# Altium schematic symbol library TitansLib.SchLib: 462 symbols (part 11 of 24)
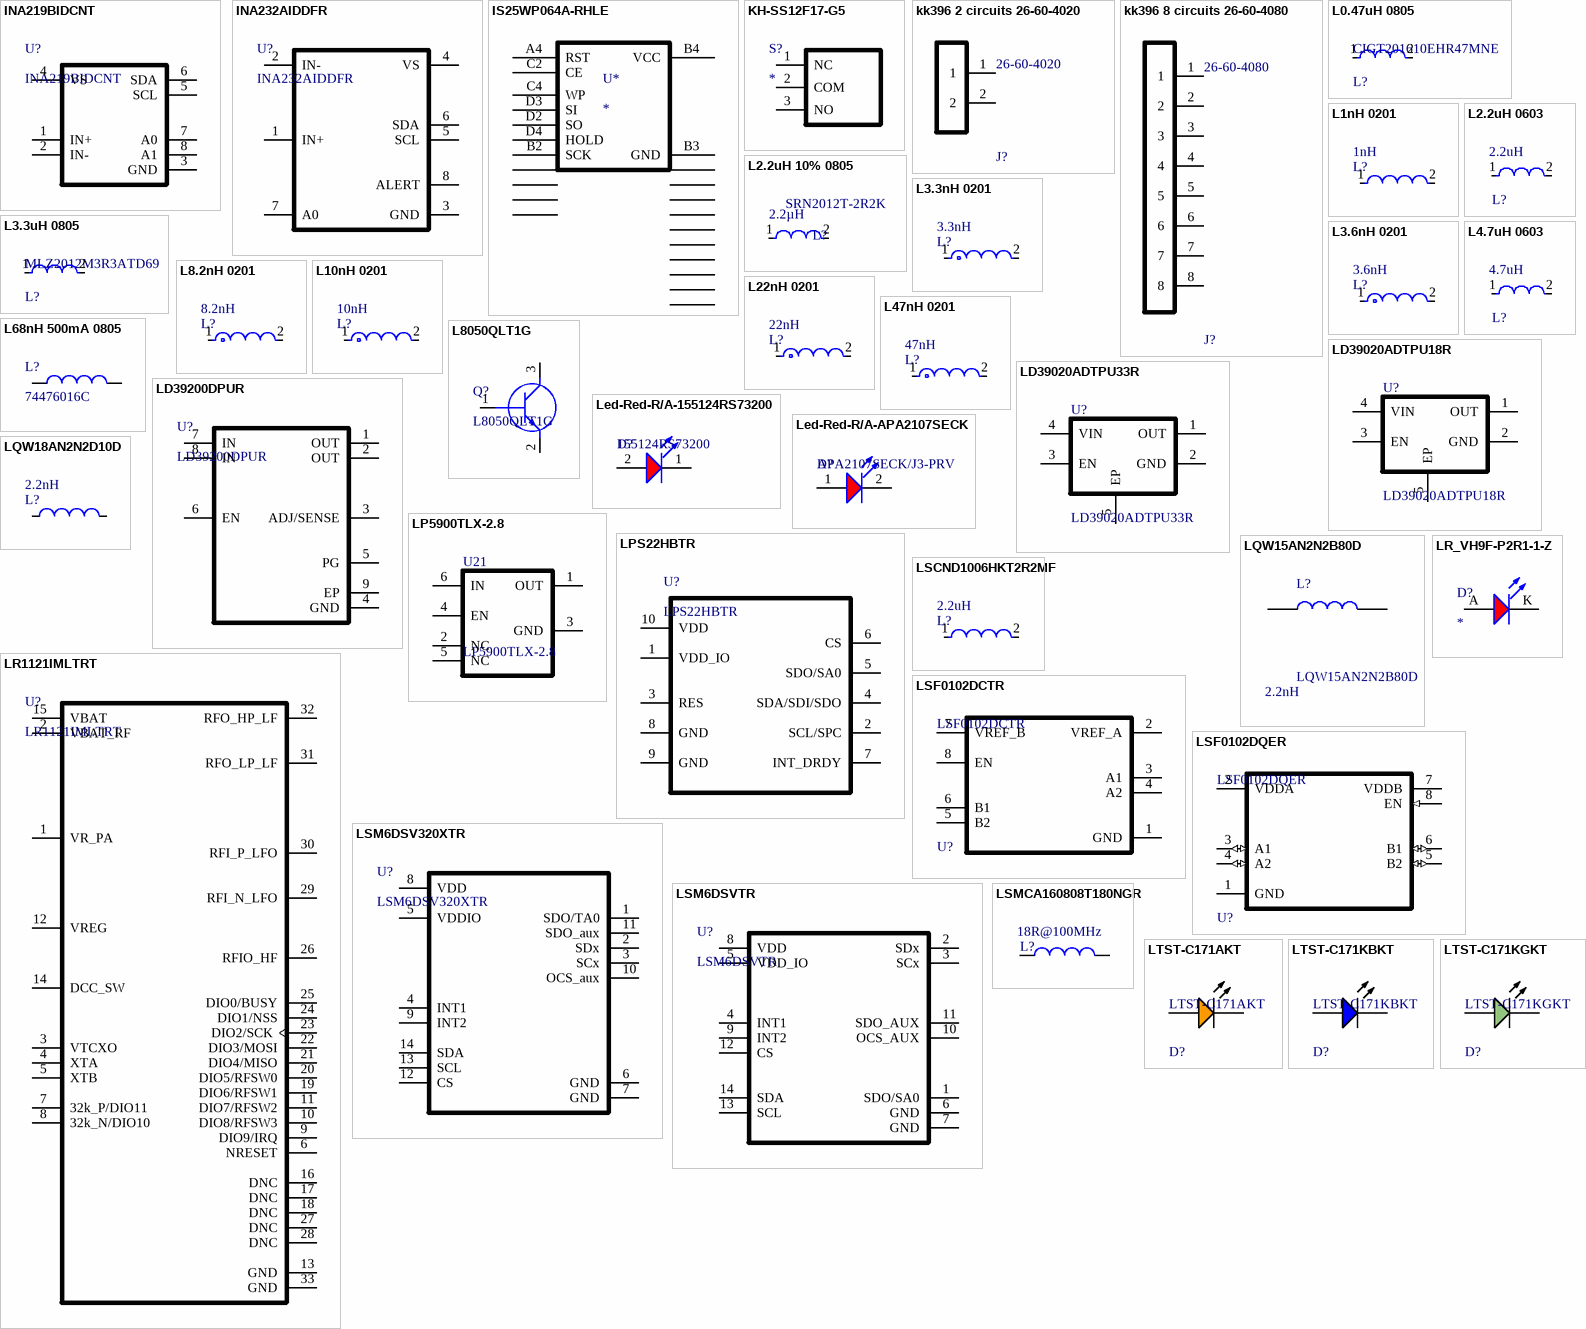
[diagram p27: symbols INA219BIDCNT to LTST-C171KGKT]

## L10nH 0201
designator L?, comment value 10nH  (hidden comment: LQP03TN10NJ02D)
Inductor RF Chip Thin Film 10nH 5% 500MHz 14Q-Factor 250mA 700mOhm DCR 0201 Paper T/R; Manufacturer: Murata; Manufacturer Lifecycle Status: IN PRODUCTION; Core Material: Non-Magnetic; DC Resistance (DCR): 700mΩ; Number of Circuits: 1; Q Factor: 14; Self Resonant Frequency: 3.2GHz; Shielding: Unshielded; Supplier: DigiKey; Supplier Part Number: 490-5568-1-ND; Manufacturer Part Number: LQP03TN10NJ02D; RoHS: Compliant; Category: Fixed Inductors; Stock: 86071; Pricing: 1=0.1, 10=0.025, 100=0.0208, 1000=0.0171, 5000=0.01491 (USD); Case/Package: 0201; Case Code (Imperial): 0201; Case Code (Metric): 0603; Composition: Thin Film; Country of Origin: Japan; Current Rating: 250mA; DC Current: 250mA; Depth: 330µm; Export Control Classification Number (ECCN) Code: EAR99; Height: 300µm; Height - Seated (Max): 330.2µm; Harmonized Tariff Schedule (HTS) Code: 8504.50.80.00; Introduction Date: 2009-08-10; Length: 600µm; Lifecycle Status: Production; Max Current Rating: 250mA; Max DC Current: 250mA; Max Operating Temperature: 125°C; Military Standard: Not; Min Operating Temperature: -55°C; Mounting Technology: Surface Mount; Number of Terminals: 2; Radiation Hardening: No; REACH SVHC: Yes; RMS Current (Irms): 250mA; Schedule B: 8504500000, 8504500000|8504500000|8504500000|8504500000|8504500000; ESR: 700mΩ; Termination: SMD/SMT; Test Frequency: 500MHz; Tolerance: 5%; Width: 300µm; ComponentLink1URL: https://datasheet.octopart.com:443/LQP03TN10NJ02D-Murata-datasheet-80324116.pdf?src-supplier=Geoflip; ComponentLink1Description: https://datasheet.octopart.com:443/LQP03TN10NJ02D-Murata-datasheet-80324116.pdf?src-supplier=Geoflip; ComponentLink2URL: https://datasheet.octopart.com:443/LQP03TN10NJ02D-Murata-datasheet-141289363.pdf?src-supplier=Ciiva; ComponentLink2Description: https://datasheet.octopart.com:443/LQP03TN10NJ02D-Murata-datasheet-141289363.pdf?src-supplier=Ciiva; ComponentLink3URL: https://datasheet.octopart.com:443/LQP03TN10NJ02D-Murata-datasheet-140715333.pdf?src-supplier=Ciiva; ComponentLink3Description: https://datasheet.octopart.com:443/LQP03TN10NJ02D-Murata-datasheet-140715333.pdf?src-supplier=Ciiva; ComponentLink4URL: https://datasheet.octopart.com:443/LQP03TN10NJ02D-Murata-datasheet-138756408.pdf?src-supplier=Ciiva; ComponentLink4Description: https://datasheet.octopart.com:443/LQP03TN10NJ02D-Murata-datasheet-138756408.pdf?src-supplier=Ciiva; ComponentLink5URL: https://datasheet.octopart.com:443/LQP03TN10NJ02D-Murata-datasheet-142296035.pdf?src-supplier=Arrow.cn; ComponentLink5Description: https://datasheet.octopart.com:443/LQP03TN10NJ02D-Murata-datasheet-142296035.pdf?src-supplier=Arrow.cn; ComponentLink6URL: https://datasheet.octopart.com:443/LQP03TN10NJ02D-Murata-datasheet-113139571.pdf?src-supplier=Future+Electronics; ComponentLink6Description: https://datasheet.octopart.com:443/LQP03TN10NJ02D-Murata-datasheet-113139571.pdf?src-supplier=Future+Electronics; ComponentLink7URL: https://datasheet.octopart.com:443/LQP03TN10NJ02D-Murata-datasheet-11551019.pdf?src-supplier=_legacy+Avnet; ComponentLink7Description: https://datasheet.octopart.com:443/LQP03TN10NJ02D-Murata-datasheet-11551019.pdf?src-supplier=_legacy+Avnet; ComponentLink8URL: https://datasheet.octopart.com/LQP03TN10NJ02D-Murata-datasheet-14391938.pdf; ComponentLink8Description: https://datasheet.octopart.com/LQP03TN10NJ02D-Murata-datasheet-14391938.pdf; ComponentLink9URL: http://sigma.octopart.com:80/reach_statement/Murata-company-16.pdf?src-supplier=Compliance+Statements; ComponentLink9Description: http://sigma.octopart.com:80/reach_statement/Murata-company-16.pdf?src-supplier=Compliance+Statements
footprint INDC0603X03N (Chip Inductor, 2-Leads, Body 0.60x0.30mm, IPC Medium Density)
pins: 1, 2

## L22nH 0201
designator L?, comment value 22nH  (hidden comment: LQP03TN22NH02D)
Inductor RF Chip Thin Film 22nH 3% 500MHz 12Q-Factor 150mA 1.9Ohm DCR 0201 Paper T/R; Manufacturer: Murata; Manufacturer Lifecycle Status: IN PRODUCTION; Manufacturer Package Identifier: 0805 (2012 metric); Core Material: Non-Magnetic; DC Resistance (DCR): 1.9Ω; Number of Circuits: 1; Q Factor: 12; Self Resonant Frequency: 2.2GHz; Shielding: Unshielded; Supplier: DigiKey; Supplier Part Number: 490-6721-1-ND; Manufacturer Part Number: LQP03TN22NH02D; RoHS: Compliant; Category: Fixed Inductors; Stock: 31878; Pricing: 1=0.1, 10=0.029, 100=0.0236, 1000=0.01938, 5000=0.0169 (USD); Case/Package: 0201; Case Code (Imperial): 0201; Case Code (Metric): 0603; Composition: Thin Film; Country of Origin: Japan; Current Rating: 150mA; DC Current: 150mA; Depth: 330µm; Export Control Classification Number (ECCN) Code: EAR99; Height: 300µm; Height - Seated (Max): 330.2µm; Harmonized Tariff Schedule (HTS) Code: 8504.50.80.00; Inductance Tolerance: 3%; Introduction Date: 2010-04-15; Length: 600µm; Lifecycle Status: Production; Max Current Rating: 150mA; Max DC Current: 150mA; Max Operating Temperature: 125°C; Military Standard: Not; Min Operating Temperature: -55°C; Mounting Technology: Surface Mount; Number of Terminals: 2; Radiation Hardening: No; REACH SVHC: Yes; RMS Current (Irms): 150mA; Schedule B: 8504500000, 8504500000|8504500000|8504500000|8504500000|8504500000; ESR: 1.9Ω; Termination: SMD/SMT; Test Frequency: 500MHz; Tolerance: 3%; Width: 300µm; ComponentLink1URL: https://datasheet.octopart.com:443/LQP03TN22NH02D-Murata-datasheet-39128549.pdf?src-supplier=Newark; ComponentLink1Description: https://datasheet.octopart.com:443/LQP03TN22NH02D-Murata-datasheet-39128549.pdf?src-supplier=Newark; ComponentLink2URL: https://datasheet.octopart.com:443/LQP03TN22NH02D-Murata-datasheet-182938155.pdf?src-supplier=element14+APAC; ComponentLink2Description: https://datasheet.octopart.com:443/LQP03TN22NH02D-Murata-datasheet-182938155.pdf?src-supplier=element14+APAC; ComponentLink3URL: https://datasheet.octopart.com:443/LQP03TN22NH02D-Murata-datasheet-140715444.pdf?src-supplier=Ciiva; ComponentLink3Description: https://datasheet.octopart.com:443/LQP03TN22NH02D-Murata-datasheet-140715444.pdf?src-supplier=Ciiva; ComponentLink4URL: https://datasheet.octopart.com:443/LQP03TN22NH02D-Murata-datasheet-138756521.pdf?src-supplier=Ciiva; ComponentLink4Description: https://datasheet.octopart.com:443/LQP03TN22NH02D-Murata-datasheet-138756521.pdf?src-supplier=Ciiva; ComponentLink5URL: https://datasheet.octopart.com:443/LQP03TN22NH02D-Murata-datasheet-140569412.pdf?src-supplier=Arrow.cn; ComponentLink5Description: https://datasheet.octopart.com:443/LQP03TN22NH02D-Murata-datasheet-140569412.pdf?src-supplier=Arrow.cn; ComponentLink6URL: https://datasheet.octopart.com:443/LQP03TN22NH02D-Murata-datasheet-80324116.pdf?src-supplier=Geoflip; ComponentLink6Description: https://datasheet.octopart.com:443/LQP03TN22NH02D-Murata-datasheet-80324116.pdf?src-supplier=Geoflip; ComponentLink7URL: https://datasheet.octopart.com:443/LQP03TN22NH02D-Murata-datasheet-11551019.pdf?src-supplier=_legacy+Avnet; ComponentLink7Description: https://datasheet.octopart.com:443/LQP03TN22NH02D-Murata-datasheet-11551019.pdf?src-supplier=_legacy+Avnet; ComponentLink8URL: https://datasheet.octopart.com/LQP03TN22NH02D-Murata-datasheet-14391948.pdf; ComponentLink8Description: https://datasheet.octopart.com/LQP03TN22NH02D-Murata-datasheet-14391948.pdf; ComponentLink9URL: http://sigma.octopart.com:80/reach_statement/Murata-company-16.pdf?src-supplier=Compliance+Statements; ComponentLink9Description: http://sigma.octopart.com:80/reach_statement/Murata-company-16.pdf?src-supplier=Compliance+Statements
footprint INDC0603X03N (Chip Inductor, 2-Leads, Body 0.60x0.30mm, IPC Medium Density)
pins: 1, 2

## L47nH 0201
designator L?, comment value 47nH  (hidden comment: LQP03TN47NJ02D)
Inductor RF Chip Thin Film 47nH 5% 300MHz 9Q-Factor 100mA 3.6Ohm DCR 0201 Paper T/R; Manufacturer: Murata; Manufacturer Lifecycle Status: IN PRODUCTION; Manufacturer Package Identifier: 0805 (2012 metric); Core Material: Non-Magnetic; DC Resistance (DCR): 3.6Ω; Number of Circuits: 1; Q Factor: 9; Self Resonant Frequency: 1.3GHz; Shielding: Unshielded; Supplier: DigiKey; Supplier Part Number: 490-6731-1-ND; Manufacturer Part Number: LQP03TN47NJ02D; RoHS: Compliant; Category: Fixed Inductors; Stock: 62389; Pricing: 1=0.1, 10=0.024, 100=0.02, 1000=0.01644, 5000=0.01434 (USD); Case/Package: 0201; Case Code (Imperial): 0201; Case Code (Metric): 0603; Composition: Thin Film; Country of Origin: Japan; Current Rating: 100mA; DC Current: 100mA; Depth: 330µm; Export Control Classification Number (ECCN) Code: EAR99; Height: 300µm; Height - Seated (Max): 330.2µm; Harmonized Tariff Schedule (HTS) Code: 8504.50.80.00; Introduction Date: 2009-08-10; Lead Free: Lead Free; Length: 600µm; Lifecycle Status: Production; Max Current Rating: 100mA; Max DC Current: 100mA; Max Operating Temperature: 125°C; Military Standard: Not; Min Operating Temperature: -55°C; Mounting Technology: Surface Mount; Number of Terminals: 2; Packaging: Tape & Reel (TR); REACH SVHC: Yes; RMS Current (Irms): 100mA; Schedule B: 8504500000; ESR: 3.6Ω; Termination: SMD/SMT; Test Frequency: 300MHz; Tolerance: 5%; Width: 300µm; ComponentLink1URL: https://datasheet.octopart.com:443/LQP03TN47NJ02D-Murata-datasheet-11551019.pdf?src-supplier=_legacy+Avnet; ComponentLink1Description: https://datasheet.octopart.com:443/LQP03TN47NJ02D-Murata-datasheet-11551019.pdf?src-supplier=_legacy+Avnet; ComponentLink2URL: https://datasheet.octopart.com:443/LQP03TN47NJ02D-Murata-datasheet-141289603.pdf?src-supplier=Ciiva; ComponentLink2Description: https://datasheet.octopart.com:443/LQP03TN47NJ02D-Murata-datasheet-141289603.pdf?src-supplier=Ciiva; ComponentLink3URL: https://datasheet.octopart.com:443/LQP03TN47NJ02D-Murata-datasheet-140715617.pdf?src-supplier=Ciiva; ComponentLink3Description: https://datasheet.octopart.com:443/LQP03TN47NJ02D-Murata-datasheet-140715617.pdf?src-supplier=Ciiva; ComponentLink4URL: https://datasheet.octopart.com:443/LQP03TN47NJ02D-Murata-datasheet-138756696.pdf?src-supplier=Ciiva; ComponentLink4Description: https://datasheet.octopart.com:443/LQP03TN47NJ02D-Murata-datasheet-138756696.pdf?src-supplier=Ciiva; ComponentLink5URL: https://datasheet.octopart.com:443/LQP03TN47NJ02D-Murata-datasheet-142296043.pdf?src-supplier=Arrow.cn; ComponentLink5Description: https://datasheet.octopart.com:443/LQP03TN47NJ02D-Murata-datasheet-142296043.pdf?src-supplier=Arrow.cn; ComponentLink6URL: https://datasheet.octopart.com:443/LQP03TN47NJ02D-Murata-datasheet-140317478.pdf?src-supplier=Farnell; ComponentLink6Description: https://datasheet.octopart.com:443/LQP03TN47NJ02D-Murata-datasheet-140317478.pdf?src-supplier=Farnell; ComponentLink7URL: https://datasheet.octopart.com:443/LQP03TN47NJ02D-Murata-datasheet-78378474.pdf?src-supplier=Future+Electronics; ComponentLink7Description: https://datasheet.octopart.com:443/LQP03TN47NJ02D-Murata-datasheet-78378474.pdf?src-supplier=Future+Electronics; ComponentLink8URL: https://datasheet.octopart.com:443/LQP03TN47NJ02D-Murata-datasheet-22952697.pdf?src-supplier=Future+Electronics; ComponentLink8Description: https://datasheet.octopart.com:443/LQP03TN47NJ02D-Murata-datasheet-22952697.pdf?src-supplier=Future+Electronics; ComponentLink9URL: https://datasheet.octopart.com:443/LQP03TN47NJ02D-Murata-datasheet-80324116.pdf?src-supplier=Geoflip; ComponentLink9Description: https://datasheet.octopart.com:443/LQP03TN47NJ02D-Murata-datasheet-80324116.pdf?src-supplier=Geoflip; ComponentLink10URL: https://datasheet.octopart.com/LQP03TN47NJ02D-Murata-datasheet-14392754.pdf; ComponentLink10Description: https://datasheet.octopart.com/LQP03TN47NJ02D-Murata-datasheet-14392754.pdf; ComponentLink11URL: http://sigma.octopart.com:80/reach_statement/Murata-company-16.pdf?src-supplier=Compliance+Statements; ComponentLink11Description: http://sigma.octopart.com:80/reach_statement/Murata-company-16.pdf?src-supplier=Compliance+Statements
footprint INDC0603X03N (Chip Inductor, 2-Leads, Body 0.60x0.30mm, IPC Medium Density)
pins: 1, 2

## L68nH 500mA 0805
designator L?, comment 74476016C
General Purpose Inductor, 0.068uH, 5%, 1 Element, Ceramic-Core, SMD, 0907; Manufacturer: Wurth Electronics; Case/Size Code: 0907; DC Resistance (DCR): 380mR; Inductor Application: RF INDUCTOR; Channels: 1; Quality Factor-Min (at L-nom): 50; Max Current Rating: 500mA; Self Resonant Frequency: 1.45GHz; Shape/Size Description: RECTANGULAR PACKAGE; Shielding: Unshielded; Test Frequency: 200MHz; Supplier: Mouser; Supplier Part Number: 710-74476016C; Manufacturer Part Number: 74476016C; RoHS: Yes; Category: Fixed Inductors; Stock: 3140; Pricing: 1=0.36, 10=0.342, 50=0.32, 100=0.297, 1000=0.269, 10000=0.249 (USD); Pins: 2; Core Material: Ceramic; Terminal Finish: Gold; Min Operating Temperature: -40°C; Max Operating Temperature: 125°C; Tolerance: 5%; Inductance-Nom (L): 0.068uH; Inductor Type: GENERAL PURPOSE INDUCTOR; Surface Mount: Yes; Terminal Placement: Dual Ended; Termination: Wraparound; JESD-609 Code: e4; Reach SVHC Compliant: Yes; RoHS Compliant: Yes; ComponentLink1URL: https://datasheet.ciiva.com:443/pdfs/VipMasterIC/IC/MIDC/MIDC-S-A0003527353/MIDC-S-A0003526892-1.pdf?src-supplier=IHS+Markit; ComponentLink1Description: https://datasheet.ciiva.com:443/pdfs/VipMasterIC/IC/MIDC/MIDC-S-A0003527353/MIDC-S-A0003526892-1.pdf?src-supplier=IHS+Markit; ComponentLink2URL: https://datasheet.ciiva.com/1049/74476016c-1049097.pdf?src-supplier=Digikey; ComponentLink2Description: https://datasheet.ciiva.com/1049/74476016c-1049097.pdf?src-supplier=Digikey; ComponentLink3URL: https://datasheet.ciiva.com/6026/1736169-6026944.pdf?src-supplier=Farnell; ComponentLink3Description: https://datasheet.ciiva.com/6026/1736169-6026944.pdf?src-supplier=Farnell; ComponentLink4URL: https://datasheet.ciiva.com/11803/0900766b80f888f1-11803604.pdf?src-supplier=Rs; ComponentLink4Description: https://datasheet.ciiva.com/11803/0900766b80f888f1-11803604.pdf?src-supplier=Rs; ComponentLink5URL: https://datasheet.ciiva.com/1049/74476016c-1049099.pdf?src-supplier=Digikey; ComponentLink5Description: https://datasheet.ciiva.com/1049/74476016c-1049099.pdf?src-supplier=Digikey; ComponentLink6URL: https://datasheet.ciiva.com/26308/74476016c-eng-tds-26308939.pdf?src-supplier=Distrelec; ComponentLink6Description: https://datasheet.ciiva.com/26308/74476016c-eng-tds-26308939.pdf?src-supplier=Distrelec; Supplier 1: Mouser; Supplier Part Number 1: 710-74476016C; Supplier 2: Digikey; Supplier Part Number 2: 732-1787-1-ND
footprint 74476016C
pins: 1, 2

## L8050QLT1G
designator Q?
Integrated Circuit; Manufacturer_Name: LRC; Datasheet Link: https://datasheet.datasheetarchive.com/originals/distributors/Datasheets-28/DSA-558356.pdf; Height: 1.11mm; Manufacturer Part Number: L8050QLT1G
footprint L8050QLT1G
pins: 1 B, 2 E, 3 C

## LD39020ADTPU18R
designator U?
LD39020 Series 200 mA 1.8 V Fixed Output LDO Voltage Regulator - DFN-4 (1 x 1); Manufacturer: STMicroelectronics; Accuracy: 2%; Max Supply Voltage: 5.5V; Max Junction Temperature (Tj): 125°C; Max Output current: 200mA; Min Input Voltage: 2.8V; Number of Channels: 1; Output Voltage: 1.8V; Polarity: Positive; Quiescent Current: 40µA; Voltage Tolerance: 1.5%; Supplier: DigiKey; Supplier Part Number: 497-15493-1-ND; Manufacturer Part Number: LD39020ADTPU18R; RoHS: Compliant; Category: LDO Voltage Regulators; Stock: 5513; Pricing: 1=0.33, 10=0.227, 25=0.2012, 100=0.1734, 250=0.16008, 500=0.15204, 1000=0.14543, 2500=0.13845, 5000=0.13424 (USD); Case/Package: DFN; China RoHS: Compliant; Height - Seated (Max): 400µm; Length: 1mm; Lifecycle Status: Production; Max Operating Temperature: 125°C; Min Operating Temperature: -40°C; Mounting Technology: Surface Mount; Number of Circuits: 1; Number of Outputs: 1; Pins: 4; Number of Regulators: 1; Number of Terminals: 4; Output Current: 200mA; Output Type: Fixed; Packaging: Tape & Reel (TR); Radiation Hardening: No; REACH SVHC: Yes; Schedule B: 8542390000, 8542390000|8542390000|8542390000|8542390000|8542390000|8542390000|8542390000|8542390000|8542390000|8542390000|8542390000|8542390000|8542390000|8542390000|8542390000|8542390000|8542390000|8542390000|8542390000|8542390000|8542390000|8542390000|8542390000|85; Terminal Pitch: 650µm; Width: 1mm; ComponentLink1URL: https://datasheet.octopart.com:443/LD39020ADTPU18R-STMicroelectronics-datasheet-44506892.pdf?src-supplier=Future+Electronics; ComponentLink1Description: https://datasheet.octopart.com:443/LD39020ADTPU18R-STMicroelectronics-datasheet-44506892.pdf?src-supplier=Future+Electronics; ComponentLink2URL: https://datasheet.octopart.com:443/LD39020ADTPU18R-STMicroelectronics-datasheet-21184921.pdf?src-supplier=Future+Electronics; ComponentLink2Description: https://datasheet.octopart.com:443/LD39020ADTPU18R-STMicroelectronics-datasheet-21184921.pdf?src-supplier=Future+Electronics; ComponentLink3URL: https://datasheet.octopart.com:443/LD39020ADTPU18R-STMicroelectronics-datasheet-62069512.pdf?src-supplier=Newark; ComponentLink3Description: https://datasheet.octopart.com:443/LD39020ADTPU18R-STMicroelectronics-datasheet-62069512.pdf?src-supplier=Newark; ComponentLink4URL: https://datasheet.octopart.com:443/LD39020ADTPU18R-STMicroelectronics-datasheet-136322598.pdf?src-supplier=TME; ComponentLink4Description: https://datasheet.octopart.com:443/LD39020ADTPU18R-STMicroelectronics-datasheet-136322598.pdf?src-supplier=TME; ComponentLink5URL: https://datasheet.octopart.com:443/LD39020ADTPU18R-STMicroelectronics-datasheet-101746762.pdf?src-supplier=Augswan; ComponentLink5Description: https://datasheet.octopart.com:443/LD39020ADTPU18R-STMicroelectronics-datasheet-101746762.pdf?src-supplier=Augswan
footprint REG_XDFN4-EPAD_CASE-711AJ_1X1_H0P4_P065
pins: 1 OUT, 2 GND, 3 EN, 4 VIN, 5 EP

## LD39020ADTPU33R
designator U?
LD39020 Series 200 mA 3.3 V Fixed Output LDO Voltage Regulator - DFN-4 (1 x 1); Manufacturer: STMicroelectronics; Accuracy: 2%; Max Supply Voltage: 5.5V; Max Junction Temperature (Tj): 125°C; Max Output current: 200mA; Min Input Voltage: 4.3V; Number of Circuits: 1; Output Voltage: 3.3V; Polarity: Positive; Quiescent Current: 40µA; Voltage Tolerance: 1.5%; Supplier: DigiKey; Supplier Part Number: 497-15496-1-ND; Manufacturer Part Number: LD39020ADTPU33R; RoHS: Compliant; Category: LDO Voltage Regulators; Stock: 7840; Pricing: 1=0.33, 10=0.228, 25=0.2024, 100=0.1744, 250=0.16096, 500=0.1529, 1000=0.14625, 2500=0.13923, 5000=0.13501 (USD); Case/Package: DFN; China RoHS: Compliant; Height - Seated (Max): 400µm; Lead Free: Lead Free; Length: 1mm; Lifecycle Status: Production; Max Operating Temperature: 125°C; Min Operating Temperature: -40°C; Mounting Technology: Surface Mount; Number of Outputs: 1; Pins: 4; Number of Regulators: 1; Number of Terminals: 4; Output Current: 200mA; Output Type: Fixed; Packaging: Tape & Reel (TR); Radiation Hardening: No; REACH SVHC: Yes; Schedule B: 8542390000, 8542390000|8542390000|8542390000|8542390000|8542390000|8542390000|8542390000|8542390000|8542390000|8542390000|8542390000|8542390000|8542390000|8542390000|8542390000|8542390000|8542390000|8542390000|8542390000|8542390000|8542390000|8542390000|8542390000|85; Terminal Pitch: 650µm; Width: 1mm; ComponentLink1URL: https://datasheet.octopart.com:443/LD39020ADTPU33R-STMicroelectronics-datasheet-44506892.pdf?src-supplier=TME; ComponentLink1Description: https://datasheet.octopart.com:443/LD39020ADTPU33R-STMicroelectronics-datasheet-44506892.pdf?src-supplier=TME; ComponentLink2URL: https://datasheet.octopart.com:443/LD39020ADTPU33R-STMicroelectronics-datasheet-21184921.pdf?src-supplier=Future+Electronics; ComponentLink2Description: https://datasheet.octopart.com:443/LD39020ADTPU33R-STMicroelectronics-datasheet-21184921.pdf?src-supplier=Future+Electronics; ComponentLink3URL: https://datasheet.octopart.com:443/LD39020ADTPU33R-STMicroelectronics-datasheet-136322598.pdf?src-supplier=Ciiva; ComponentLink3Description: https://datasheet.octopart.com:443/LD39020ADTPU33R-STMicroelectronics-datasheet-136322598.pdf?src-supplier=Ciiva; ComponentLink4URL: https://datasheet.octopart.com:443/LD39020ADTPU33R-STMicroelectronics-datasheet-101746762.pdf?src-supplier=SHENGYU+ELECTRONICS; ComponentLink4Description: https://datasheet.octopart.com:443/LD39020ADTPU33R-STMicroelectronics-datasheet-101746762.pdf?src-supplier=SHENGYU+ELECTRONICS; Supplier 1: DigiKey; Supplier Part Number 1: 497-15496-1-ND; Supplier 2: DigiKey; Supplier Part Number 2: 497-15496-2-ND; Supplier 3: Mouser; Supplier Part Number 3: 511-LD39020ADTPU33R
footprint REG_XDFN4-EPAD_CASE-711AJ_1X1_H0P4_P065
pins: 1 OUT, 2 GND, 3 EN, 4 VIN, 5 EP

## LD39200DPUR
designator U?
2 A high PSRR utra low drop linear regulator with reverse current protection; Manufacturer: STMicroelectronics; Accuracy: 1%; Dropout Voltage: 130mV; Max Supply Voltage: 6V; Max Junction Temperature (Tj): 125°C; Max Output current: 2A; Min Input Voltage: 1.25V; Number of Channels: 1; Operating Supply Current: 1mA; Output Type: Adjustable; Output Voltage: 4.89V; Polarity: Positive; Quiescent Current: 300µA; Supplier: DigiKey; Supplier Part Number: 497-14961-1-ND; Manufacturer Part Number: LD39200DPUR; RoHS: Compliant; Category: LDO Voltage Regulators; Stock: 7467; Pricing: 1=1.04, 10=0.75, 25=0.6776, 100=0.5975, 250=0.55928, 500=0.53622, 1000=0.51725 (USD); Case/Package: DFN; China RoHS: Compliant; Country of Origin: Mainland China; Export Control Classification Number (ECCN) Code: EAR99; Height: 1mm; Height - Seated (Max): 1mm; Harmonized Tariff Schedule (HTS) Code: 8542.39.00.60; Introduction Date: 2014-07-28; Lead Free: Lead Free; Length: 4mm; Lifecycle Status: Production; Max Operating Temperature: 125°C; Min Operating Temperature: -40°C; Min Supply Voltage: 1.25V; Mounting Technology: Surface Mount; Number of Circuits: 1; Number of Outputs: 1; Pins: 8; Number of Regulators: 1; Number of Terminals: 8; Output Current: 2A; Packaging: Tape & Reel; Radiation Hardening: No; REACH SVHC: Yes; Schedule B: 8542390000, 8542390000|8542390000|8542390000|8542390000|8542390000; Terminal Pitch: 800µm; Width: 4mm; ComponentLink1URL: https://datasheet.octopart.com:443/LD39200DPUR-STMicroelectronics-datasheet-104525727.pdf?src-supplier=Upverter; ComponentLink1Description: https://datasheet.octopart.com:443/LD39200DPUR-STMicroelectronics-datasheet-104525727.pdf?src-supplier=Upverter; ComponentLink2URL: https://datasheet.octopart.com:443/LD39200DPUR-STMicroelectronics-datasheet-62333363.pdf?src-supplier=Augswan; ComponentLink2Description: https://datasheet.octopart.com:443/LD39200DPUR-STMicroelectronics-datasheet-62333363.pdf?src-supplier=Augswan; ComponentLink3URL: https://datasheet.octopart.com:443/LD39200DPUR-STMicroelectronics-datasheet-31820395.pdf?src-supplier=Future+Electronics; ComponentLink3Description: https://datasheet.octopart.com:443/LD39200DPUR-STMicroelectronics-datasheet-31820395.pdf?src-supplier=Future+Electronics; ComponentLink4URL: https://datasheet.octopart.com:443/LD39200DPUR-STMicroelectronics-datasheet-165583398.pdf?src-supplier=TME; ComponentLink4Description: https://datasheet.octopart.com:443/LD39200DPUR-STMicroelectronics-datasheet-165583398.pdf?src-supplier=TME; Supplier 1: DigiKey; Supplier Part Number 1: 497-14961-1-ND; Supplier 2: DigiKey; Supplier Part Number 2: 497-14961-2-ND; Supplier 3: Mouser; Supplier Part Number 3: 511-LD39200DPUR
footprint QFN80P400X400X100_HS-9N (QFN, 8-Leads, Body 4.00x4.00mm, Pitch 0.80mm, Thermal Pad 2.18x3.03mm, IPC Medium Density)
pins: 1 OUT, 2 OUT, 3 ADJ/SENSE, 4 GND, 5 PG, 6 EN, 7 IN, 8 IN, 9 EP

## Led-Red-R/A-155124RS73200
designator D?, comment 155124RS73200
Single Color LED, Red, Water Clear, 2mm; NexarPartId: 29717822; Manufacturer: Wurth Electronics; Lens Style: Clear, Dome; Test Current: 20mA; Reverse Voltage: 5V; Forward Voltage: 2V; Wavelength: 624nm; Viewing Angle: 120°; Forward Current: 100mA; Peak Wavelength: 632nm; Power Dissipation: 60mW; Luminous Intensity: 130mcd; Shape: Rectangular; Channels: 1; Overall Height: 1mm; RoHS: Compliant; REACH SVHC: Unknown; Height: 1mm; Length: 3.2mm; Case/Package: 1204; Dominant Wavelength: 624nm; Max Operating Temperature: 85°C; Mount: Surface Mount; Width: 1.5mm; Color: Red; Min Operating Temperature: -40°C; Max Reverse Voltage (DC): 5V; Packaging: Tape and Reel; Supplier: Digikey; Supplier Part Number: 732-5025-1-ND; Manufacturer Part Number: 155124RS73200; Category: LEDs; Stock: 45198; Pricing: 1=0.2, 50=0.188, 100=0.163, 500=0.1576 (USD); Mounting Technology: Surface Mount; Pins: 3; Optoelectronic Device Type: SINGLE COLOR LED; Luminous Intensity-Nom: 130mcd; Size: 2mm; Reach SVHC Compliant: Yes; RoHS Compliant: Yes; ComponentLink1URL: https://datasheet.ciiva.com:443/pdfs/VipMasterIC/IC/MIDC/MIDC-S-A0007455960/MIDC-S-A0007455960-1.pdf?src-supplier=IHS+Markit; ComponentLink1Description: https://datasheet.ciiva.com:443/pdfs/VipMasterIC/IC/MIDC/MIDC-S-A0007455960/MIDC-S-A0007455960-1.pdf?src-supplier=IHS+Markit; ComponentLink2URL: https://datasheet.ciiva.com/22657/155124rs73200-22657057.pdf?src-supplier=Element14; ComponentLink2Description: https://datasheet.ciiva.com/22657/155124rs73200-22657057.pdf?src-supplier=Element14; ComponentLink3URL: https://datasheet.ciiva.com/29278/759458-da-01-en-smd-chipled-s-v-rot-155124rs73200-29278943.pdf?src-supplier=Conrad; ComponentLink3Description: https://datasheet.ciiva.com/29278/759458-da-01-en-smd-chipled-s-v-rot-155124rs73200-29278943.pdf?src-supplier=Conrad; ComponentLink4URL: https://datasheet.ciiva.com/29563/155124rs73200-29563003.pdf?src-supplier=Digikey; ComponentLink4Description: https://datasheet.ciiva.com/29563/155124rs73200-29563003.pdf?src-supplier=Digikey; ComponentLink5URL: https://datasheet.ciiva.com/29563/155124rs73200-29563004.pdf?src-supplier=Digikey; ComponentLink5Description: https://datasheet.ciiva.com/29563/155124rs73200-29563004.pdf?src-supplier=Digikey; ComponentLink6URL: https://datasheet.ciiva.com/29563/155124rs73200-29563005.pdf?src-supplier=Digikey; ComponentLink6Description: https://datasheet.ciiva.com/29563/155124rs73200-29563005.pdf?src-supplier=Digikey; ComponentLink7URL: https://datasheet.ciiva.com/48430/155124rs73200-eng-tds-48430070.pdf?src-supplier=Distrelec; ComponentLink7Description: https://datasheet.ciiva.com/48430/155124rs73200-eng-tds-48430070.pdf?src-supplier=Distrelec
footprint WL-SMSW_1204_L3.2W1.5H1 (SMD Mono-color Side view Waterclear, body 3.2x1.5mm)
pins: 1 K, 2 A

## Led-Red-R/A-APA2107SECK
designator D?, comment APA2107SECK/J3-PRV
Red 625nm LED Indication - Discrete 2.2V 2-SMD, No Lead; Manufacturer: Kingbright; Forward Current: 30mA; Luminous Intensity: 1.1cd; Number of Circuits: 1; Peak Wavelength: 640nm; Shape: Rectangular; Viewing Angle: 140°; Supplier: DigiKey; Supplier Part Number: 754-2097-1-ND; Manufacturer Part Number: APA2107SECK/J3-PRV; RoHS: Compliant; Category: LEDs; Stock: 82803; Pricing: 1=0.48, 10=0.328, 100=0.2351, 500=0.19314, 1000=0.17931 (USD); China RoHS: Compliant; Contact Plating: Tin; Height: 600µm; Lifecycle Status: Production; Max Operating Temperature: 85°C; Min Operating Temperature: -40°C; Mounting Technology: Surface Mount; Number of Terminals: 2; REACH SVHC: Yes; Terminal Pitch: 2.4mm; ComponentLink1URL: https://datasheet.octopart.com:443/APA2107SECK-J3-PRV-Kingbright-datasheet-180515254.pdf?src-supplier=Sager+Electronics; ComponentLink1Description: https://datasheet.octopart.com:443/APA2107SECK-J3-PRV-Kingbright-datasheet-180515254.pdf?src-supplier=Sager+Electronics; ComponentLink2URL: https://datasheet.octopart.com:443/APA2107SECK-J3-PRV-Kingbright-datasheet-138813455.pdf?src-supplier=Sager+Electronics; ComponentLink2Description: https://datasheet.octopart.com:443/APA2107SECK-J3-PRV-Kingbright-datasheet-138813455.pdf?src-supplier=Sager+Electronics
footprint APA2107SECK/J3-PRV (Red 625nm LED Indication - Discrete 2.2V 2-SMD, No Lead)
pins: 1 A, 2 K

## LP5900TLX-2.8
designator U21
Fixed Positive Standard Regulator, 2.8VCMOS, PBGA4; Manufacturer: TI National Semiconductor; Manufacturer Part Number: LP5900TLX-2.8/NOPB; Package Body Material: Plastic; Dropout Voltage1-Nom: 80mV; Input Voltage Absolute-Max: 6V; Number of Outputs: 1; Output Current1-Max: 150mA; Output Voltage1-Nom: 2.8V; Voltage Tolerance-Max: 2%; Max Supply Voltage: 5.5V; Min Input Voltage: 2.5V; Output Voltage1-Max: 2.856V; Output Voltage1-Min: 2.744V; Regulator Type: FIXED POSITIVE SINGLE OUTPUT STANDARD REGULATOR; Time @ Peak Reflow Temperature-Max (s): 40s; Qualification Status: Not Qualified; Supplier 1: Digikey; Supplier Part Number 1: 296-48931-1-ND; Supplier 2: Mouser; Supplier Part Number 2: 926-LP5900TLX28NOPB; Supplier: Digikey; Supplier Part Number: 296-48931-1-ND; RoHS: Yes; Category: Voltage Regulators - Linear; Stock: 1195; Pricing: 1=0.63, 10=0.449, 25=0.4024, 100=0.3513, 250=0.32696, 500=0.31228, 1000=0.30019 (USD); Case/Package: VFBGA; Pins: 4; Package Shape: Rectangular; Terminal Finish: Copper; JESD-609 Code: e1; Adjustability: FIXED; Moisture Sensitivity Level: 1; Operating Temperature, TJ-Max: 125°C; Operating Temperature, TJ-Min: -40°C; Package Style: GRID ARRAY, VERY THIN PROFILE, FINE PITCHMeter; Packaging: Tape and Reel; Surface Mount: Yes; Technology: CMOS; Terminal Form: Ball; Terminal Position: BOTTOM; Channels: 1; Peak Reflow Temperature (Cel): 260°C; Length: 1.09mm; Width: 1.065mm; Terminal Pitch: 0.5mm; Height - Seated (Max): 0.675mm; Reach SVHC Compliant: Yes; RoHS Compliant: Yes; ComponentLink1URL: https://datasheet.ciiva.com:443/pdfs/VipMasterIC/IC/NATL/NATLS11477/NATLS11477-1.pdf?src-supplier=IHS+Markit; ComponentLink1Description: https://datasheet.ciiva.com:443/pdfs/VipMasterIC/IC/NATL/NATLS11477/NATLS11477-1.pdf?src-supplier=IHS+Markit; ComponentLink2URL: https://datasheet.ciiva.com/6582/lp5900-6582956.pdf?src-supplier=Digikey; ComponentLink2Description: https://datasheet.ciiva.com/6582/lp5900-6582956.pdf?src-supplier=Digikey
footprint LP5900SPX-2.8/NOPB
pins: 1 OUT, 2 NC, 3 GND, 4 EN, 5 NC, 6 IN

## LPS22HBTR
designator U?
Piezoresistive Sensor, Absolute, 3.77Psi Min, 18.27Psi Max, 0.2-1.5V, Square, Surface Mount; Manufacturer: STMicroelectronics; Output Type: DIGITAL OUTPUT; Number of Bits: 24; Operating Current-Max: 15uA; Output Interface Type: 3-WIRE; Port Type: HOLE; Pressure Range-Max: 18.274PSI; Sensor Type: PRESSURE SENSOR,PEIZORESISTIVE; Max Supply Voltage: 3.6V; Min Supply Voltage: 1.7V; Body Breadth: 2mm; Body Height: 0.8mm; Supplier: Mouser; Supplier Part Number: 511-LPS22HBTR; Manufacturer Part Number: LPS22HBTR; RoHS: Yes; Category: Pressure Sensors; Pricing: 1=2.61, 10=2.1, 50=2.01, 100=1.93, 1000=1.71, 10000=1.56 (USD); Mounting Technology: Surface Mount; Package Shape/Style: Square; Terminal Finish: Gold; Min Operating Temperature: -40°C; Max Operating Temperature: 85°C; JESD-609 Code: e4; Pressure Range-Min: 3.77PSI; Pressure Type: Absolute; Termination: Solder; Body Length or Diameter: 2mm; Reach SVHC Compliant: Yes; RoHS Compliant: Yes; ComponentLink1URL: https://datasheet.ciiva.com:443/pdfs/VipMasterIC/IC/SGST/SGST-S-A0003328868/SGST-S-A0003328868-1.pdf?src-supplier=IHS+Markit; ComponentLink1Description: https://datasheet.ciiva.com:443/pdfs/VipMasterIC/IC/SGST/SGST-S-A0003328868/SGST-S-A0003328868-1.pdf?src-supplier=IHS+Markit; ComponentLink2URL: http://www.farnell.com/datasheets/2309382.pdf?src-supplier=Farnell; ComponentLink2Description: http://www.farnell.com/datasheets/2309382.pdf?src-supplier=Farnell; ComponentLink3URL: http://www.st.com/content/ccc/resource/technical/document/datasheet/bf/c1/4f/23/61/17/44/8a/DM00140895.pdf/files/DM00140895.pdf/jcr:content/translations/en.DM00140895.pdf?src-supplier=Digikey; ComponentLink3Description: http://www.st.com/content/ccc/resource/technical/document/datasheet/bf/c1/4f/23/61/17/44/8a/DM00140895.pdf/files/DM00140895.pdf/jcr:content/translations/en.DM00140895.pdf?src-supplier=Digikey; ComponentLink4URL: http://www.farnell.com/datasheets/2309382.pdf?src-supplier=Newark; ComponentLink4Description: http://www.farnell.com/datasheets/2309382.pdf?src-supplier=Newark; ComponentLink5URL: http://www.farnell.com/datasheets/2309382.pdf?src-supplier=Element14; ComponentLink5Description: http://www.farnell.com/datasheets/2309382.pdf?src-supplier=Element14; ComponentLink6URL: https://datasheet.octopart.com/LPS22HBTR-STMicroelectronics-datasheet-61770072.pdf?src-supplier=Element14; ComponentLink6Description: https://datasheet.octopart.com/LPS22HBTR-STMicroelectronics-datasheet-61770072.pdf?src-supplier=Element14; ComponentLink7URL: https://datasheet.octopart.com/LPS22HBTR-STMicroelectronics-datasheet-102371185.pdf?src-supplier=Future+Electronics; ComponentLink7Description: https://datasheet.octopart.com/LPS22HBTR-STMicroelectronics-datasheet-102371185.pdf?src-supplier=Future+Electronics; Supplier 1: Digikey; Supplier Part Number 1: 497-16265-1-ND; Supplier 2: Mouser; Supplier Part Number 2: 511-LPS22HBTR
footprint LPS22HBTR
pins: 1 VDD_IO, 2 SCL/SPC, 3 RES, 4 SDA/SDI/SDO, 5 SDO/SA0, 6 CS, 7 INT_DRDY, 8 GND, 9 GND, 10 VDD

## LQW15AN2N2B80D
designator L?  value 2.2nH
2.2 nH Unshielded Wirewound Inductor 2.53 A 22mOhm Max 0402 (1005 Metric); Manufacturer_Name: Murata Electronics; Geometry.Height: 0.6mm; Manufacturer_Part_Number: LQW15AN2N2B80D; Mouser Part Number: 81-LQW15AN2N2B80D; Mouser Price/Stock: https://www.mouser.com/Search/Refine.aspx?Keyword=81-LQW15AN2N2B80D; Arrow Part Number: *; Arrow Price/Stock: *; Datasheet Link: https://search.murata.co.jp/Ceramy/image/img/P02/JELF243A-0100.pdf
footprint LQW15AN10NG80D
pins: 1, 2

## LQW18AN2N2D10D
designator L?  value 2.2nH  (hidden comment: LQW18AN2N2D10D)
Inductor RF Chip Wirewound 2.2nH 0.5nH 100MHz 25Q-Factor 1.4A 18mOhm DCR 0603 Paper T/R; Manufacturer: Murata; Manufacturer Lifecycle Status: IN PRODUCTION; Core Material: Air; Current: 1A; DC Resistance (DCR): 18mΩ; Number of Circuits: 1; Q Factor: 25; Self Resonant Frequency: 18GHz; Shielding: No; Test Frequency: 250MHz; Tolerance: 22.7273%; Supplier: DigiKey; Supplier Part Number: 490-6881-1-ND; Manufacturer Part Number: LQW18AN2N2D10D; RoHS: Compliant; Category: Fixed Inductors; Stock: 6639; Pricing: 1=0.12, 10=0.1, 100=0.082, 1000=0.06746 (USD); Case/Package: 0603; Case Code (Imperial): 0402; Case Code (Metric): 1005; Composition: Wirewound; Current Rating: 1.4A; DC Current: 1.4A; Depth: 1.1mm; Height: 800µm; Lead Free: Lead Free; Length: 1.6mm; Lifecycle Status: Production; Max Current Rating: 1.4A; Max DC Current: 1.4A; Max Operating Temperature: 125°C; Military Standard: Not; Min Operating Temperature: -55°C; Mounting Technology: Surface Mount; Number of Terminals: 2; Radiation Hardening: No; REACH SVHC: Yes; RMS Current (Irms): 1.4A; Schedule B: 8504500000, 8504500000|8504500000, 8504500000|8504500000|8504500000, 8504500000|8504500000|8504500000|8504500000; ESR: 18mΩ; Termination: SMD/SMT; Weight: 3.005049mg; Width: 800µm; ComponentLink1URL: https://datasheet.octopart.com:443/LQW18AN2N2D10D-Murata-datasheet-11547189.pdf?src-supplier=_legacy+Avnet; ComponentLink1Description: https://datasheet.octopart.com:443/LQW18AN2N2D10D-Murata-datasheet-11547189.pdf?src-supplier=_legacy+Avnet; ComponentLink2URL: https://datasheet.octopart.com:443/LQW18AN2N2D10D-Murata-datasheet-525201.pdf?src-supplier=_legacy+Avnet; ComponentLink2Description: https://datasheet.octopart.com:443/LQW18AN2N2D10D-Murata-datasheet-525201.pdf?src-supplier=_legacy+Avnet; ComponentLink3URL: https://datasheet.octopart.com:443/LQW18AN2N2D10D-Murata-datasheet-145452282.pdf?src-supplier=Geoflip; ComponentLink3Description: https://datasheet.octopart.com:443/LQW18AN2N2D10D-Murata-datasheet-145452282.pdf?src-supplier=Geoflip; ComponentLink4URL: https://datasheet.octopart.com:443/LQW18AN2N2D10D-Murata-datasheet-140717801.pdf?src-supplier=Ciiva; ComponentLink4Description: https://datasheet.octopart.com:443/LQW18AN2N2D10D-Murata-datasheet-140717801.pdf?src-supplier=Ciiva; ComponentLink5URL: https://datasheet.octopart.com:443/LQW18AN2N2D10D-Murata-datasheet-140717666.pdf?src-supplier=Ciiva; ComponentLink5Description: https://datasheet.octopart.com:443/LQW18AN2N2D10D-Murata-datasheet-140717666.pdf?src-supplier=Ciiva; ComponentLink6URL: https://datasheet.octopart.com:443/LQW18AN2N2D10D-Murata-datasheet-138758829.pdf?src-supplier=Ciiva; ComponentLink6Description: https://datasheet.octopart.com:443/LQW18AN2N2D10D-Murata-datasheet-138758829.pdf?src-supplier=Ciiva; ComponentLink7URL: https://datasheet.octopart.com:443/LQW18AN2N2D10D-Murata-datasheet-142296111.pdf?src-supplier=Arrow.cn; ComponentLink7Description: https://datasheet.octopart.com:443/LQW18AN2N2D10D-Murata-datasheet-142296111.pdf?src-supplier=Arrow.cn; ComponentLink8URL: https://datasheet.octopart.com:443/LQW18AN2N2D10D-Murata-datasheet-14067233.pdf?src-supplier=iiiC; ComponentLink8Description: https://datasheet.octopart.com:443/LQW18AN2N2D10D-Murata-datasheet-14067233.pdf?src-supplier=iiiC; ComponentLink9URL: https://datasheet.octopart.com/LQW18AN2N2D10D-Murata-datasheet-14392333.pdf; ComponentLink9Description: https://datasheet.octopart.com/LQW18AN2N2D10D-Murata-datasheet-14392333.pdf; ComponentLink10URL: https://datasheet.octopart.com:443/LQW18AN2N2D10D-Murata-datasheet-44661303.pdf?src-supplier=Future+Electronics; ComponentLink10Description: https://datasheet.octopart.com:443/LQW18AN2N2D10D-Murata-datasheet-44661303.pdf?src-supplier=Future+Electronics; ComponentLink11URL: http://sigma.octopart.com:80/reach_statement/Murata-company-16.pdf?src-supplier=Compliance+Statements; ComponentLink11Description: http://sigma.octopart.com:80/reach_statement/Murata-company-16.pdf?src-supplier=Compliance+Statements
footprint INDC1608X10N (Chip Inductor, 2-Leads, Body 1.60x0.80mm, IPC Medium Density)
pins: 1, 2

## LR1121IMLTRT
designator U?
Multi-Band LoRa Transceiver, 150 MHz to 2.5 GHz, 32 Pins, QFN-EP; Manufacturer: Semtech; Supplier: DigiKey; Supplier Part Number: 600-LR1121IMLTRTCT-ND; Manufacturer Part Number: LR1121IMLTRT; RoHS: Compliant; Category: RF Receivers, Transceivers; Stock: 7017; Pricing: 1=7.61, 10=6.596, 25=6.2444, 100=5.7616, 250=5.47224, 500=5.26798, 1000=5.07563 (USD); Country of Origin: Malaysia; Harmonized Tariff Schedule (HTS) Code: 8542.39.00.01; Introduction Date: 2023-03-08; Lifecycle Status: Production; REACH SVHC: Yes; ComponentLink1URL: https://datasheet.octopart.com:443/LR1121IMLTRT-Semtech-datasheet-180730397.pdf?src-supplier=IHS; ComponentLink1Description: https://datasheet.octopart.com:443/LR1121IMLTRT-Semtech-datasheet-180730397.pdf?src-supplier=IHS; Supplier 1: DigiKey; Supplier Part Number 1: 600-LR1121IMLTRTCT-ND; Supplier 2: DigiKey; Supplier Part Number 2: 600-LR1121IMLTRTTR-ND; Supplier 3: Mouser; Supplier Part Number 3: 947-LR1121IMLTRT
footprint QFN32L_5x5mm (32 Leads, Body 5.0x5.0mm, Pitch 0.50mm, QFN32L)
pins: 1 VR_PA "Regulated power amplifier supply, for all power amplifiers", 2 VBAT_RF "Battery supply", 3 VTCXO "Internally generated supply for external TCXO frequency reference", 4 XTA "32MHz crystal connection, or external TCXO frequency reference input", 5 XTB "32MHz crystal connection, or NC in case of external TCXO usage", 6 NRESET "Reset signal, active low", 7 32k_P/DIO11 "32.768kHz crystal connection, or input for 32.768kHz reference clock/Multi-purpose digital I/O", 8 32k_N/DIO10 "32.768kHz crystal oscillator connection/Multi-purpose digital I/O", 9 DIO9/IRQ "Multi-purpose digital I/O", 10 DIO8/RFSW3 "Multi-purpose digital I/O", 11 DIO7/RFSW2 "Multi-purpose digital I/O", 12 VREG "Regulated output voltage from the internal regulator LDO/ DC-DC", 13 GND "Ground", 14 DCC_SW "DC-DC Switcher Output", 15 VBAT "Battery supply", 16 DNC "Do not connect", 17 DNC "Do not connect", 18 DNC "Do not connect", 19 DIO6/RFSW1 "Multi-purpose digital I/O", 20 DIO5/RFSW0 "Multi-purpose digital I/O", 21 DIO4/MISO "Multi-purpose digital I/O", 22 DIO3/MOSI "Multi-purpose digital I/O", 23 DIO2/SCK "Multi-purpose digital I/O", 24 DIO1/NSS "Multi-purpose digital I/O", 25 DIO0/BUSY "Multi-purpose digital I/O", 26 RFIO_HF "RF input/output for any frequency over 1.9GHz", 27 DNC "Do not connect", 28 DNC "Do not connect", 29 RFI_N_LFO "RF LF receiver input, sub-GHz operation", 30 RFI_P_LFO "RF LF receiver input, sub-GHz operation", 31 RFO_LP_LF "RF transmitter output for the low power PA, sub-GHz operation", 32 RFO_HP_LF "RF transmitter output for the high power PA, sub-GHz operation", 33 GND "Ground"

## LR_VH9F-P2R1-1-Z
designator D?
LED Uni-Color Red 632nm 2-Pin Chip 0402(1006Metric) T/R; MF: OSRAM Opto (ams OSRAM); MP: LR VH9F-P2R1-1-Z; Value: *; SnapEDA_Link: https://www.snapeda.com/parts/LR%20VH9F-P2R1-1-Z/SRAM/view-part/?ref=snap; Purchase-URL: https://pricing.snapeda.com/search/part/LR VH9F-P2R1-1-Z/?ref=eda; Check_prices: https://www.snapeda.com/parts/LR%20VH9F-P2R1-1-Z/SRAM/view-part/?ref=eda; Digi-Key_Part_Number: 475-3429-2-ND; Package: None
footprint LED_LT_VH9G-Q2OO-25-1
pins: A, K

## LSCND1006HKT2R2MF
designator L?  value 2.2uH  (hidden comment: LSCND1006HKT2R2MF)
General Purpose Inductor, 2.2uH, 20%, 1 Element, Metal Core-Core, SMD, 0402; Manufacturer: TAIYO YUDEN; DC Resistance (DCR): 375mΩ; Max Current Rating: 600mA; Number of Circuits: 1; Shielding: Unshielded; Test Frequency: 1MHz; Supplier: DigiKey; Supplier Part Number: 587-LSCND1006HKT2R2MFCT-ND; Manufacturer Part Number: LSCND1006HKT2R2MF; RoHS: Compliant; Category: Fixed Inductors; Stock: 13616; Pricing: 1=0.49, 10=0.401, 100=0.3296, 1000=0.27102 (USD); Case/Package: 0402; Height: 800µm; Length: 1mm; Lifecycle Status: Production; Max Operating Temperature: 125°C; Min Operating Temperature: -40°C; Number of Terminals: 2; REACH SVHC: Yes; Tolerance: 20%; Width: 600µm; Supplier 1: DigiKey; Supplier Part Number 1: 587-LSCND1006HKT2R2MFCT-ND; Supplier 2: DigiKey; Supplier Part Number 2: 587-LSCND1006HKT2R2MFTR-ND; Supplier 3: Mouser; Supplier Part Number 3: 963-LSCND1006HKT2R2F
footprint INDC1006X08N (Chip Inductor, 2-Leads, Body 1.00x0.60mm, IPC Medium Density)
pins: 1, 2

## LSF0102DCTR
designator U?
Dual bidirectional multivoltage level translator 8-SSOP -40 to 125; Manufacturer: Texas Instruments; Manufacturer Lifecycle Status: ACTIVE; Data Rate: 200Mbps; High Level Output Current: 64mA; Max Junction Temperature (Tj): 150°C; Max Supply Voltage: 5V; Min Supply Voltage: 0V; Nominal Supply Current: 1µA; Number of Bits: 1; Propagation Delay: 1.3ns; Topology: Push-Pull; Supplier: DigiKey; Supplier Part Number: 296-40398-1-ND; Manufacturer Part Number: LSF0102DCTR; RoHS: Compliant; Category: Voltage Level Shifters; Stock: 5931; Pricing: 1=0.58, 10=0.406, 25=0.3632, 100=0.3166, 250=0.29432, 500=0.28086, 1000=0.26981 (USD); Ambient Temperature Range High: 125°C; Case/Package: SSOP; Channel Type: Bidirectional; Height: 1.3mm; Lead Free: Lead Free; Length: 2.95mm; Lifecycle Status: Production; Logic Function: Translator; Low Level Output Current: 64mA; Max Operating Temperature: 125°C; Min Operating Temperature: -40°C; Mounting Technology: Surface Mount; Number of Circuits: 1; Number of Inputs: 1; Number of Outputs: 1; Pins: 8; Packaging: Tape & Reel (TR); Radiation Hardening: No; Schedule B: 8542390000, 8542390000|8542390000, 8542390000|8542390000|8542390000, 8542390000|8542390000|8542390000|8542390000; Thickness: 1.29mm; Weight: 19.986414mg; Width: 2.8mm; ComponentLink1URL: https://sigma.octopart.com:443/154719557/technical_drawing/Texas-Instruments-LSF0102DCTR.pdf?src-supplier=Texas+Instruments; ComponentLink1Description: https://sigma.octopart.com:443/154719557/technical_drawing/Texas-Instruments-LSF0102DCTR.pdf?src-supplier=Texas+Instruments; ComponentLink2URL: https://octopart.com:443/opatz8j6/c1?t=W26EZHeWI9vURU_bzru2E3BRCm7sWisPWzfp9R8_g8CG-Q2MgfIC3dVTaWGOLl2AoAamaKTjkG6okCoeOOa_Dtyc2bYtPXwIfZVqieGYMZheYRNQqZCXzay2OOSOBXCJ88Z11TbhWF7sX-iTItb7e1EIaGstxBQsr8-0k_GflVNeAgKVStVS7gInAilMrn2_JwrChpAdU1HW_QLxbPLtyh5cHPsjVZdheDFthslEgArXoYdq9KuUtGtj2Oitj-QW5bDq5WeypHWmQr3fqt8UL2H7V0Gd-HnEMvplPpXfGQRf-pVkh7khO0Lh-HbE1YdpJ3dFfzFUBZHIsJs3Iz8r4130Ncy_iAnSnYXov-gm9Y9ruxyN59IORb40ixBvQPON2krZ1kE&src-supplier=Texas+Instruments; ComponentLink2Description: https://octopart.com:443/opatz8j6/c1?t=W26EZHeWI9vURU_bzru2E3BRCm7sWisPWzfp9R8_g8CG-Q2MgfIC3dVTaWGOLl2AoAamaKTjkG6okCoeOOa_Dtyc2bYtPXwIfZVqieGYMZheYRNQqZCXzay2OOSOBXCJ88Z11TbhWF7sX-iTItb7e1EIaGstxBQsr8-0k_GflVNeAgKVStVS7gInAilMrn2_JwrChpAdU1HW_QLxbPLtyh5cHPsjVZdheDFthslEgArXoYdq9KuUtGtj2Oitj-QW5bDq5WeypHWmQr3fqt8UL2H7V0Gd-HnEMvplPpXfGQRf-pVkh7khO0Lh-HbE1YdpJ3dFfzFUBZHIsJs3Iz8r4130Ncy_iAnSnYXov-gm9Y9ruxyN59IORb40ixBvQPON2krZ1kE&src-supplier=Texas+Instruments; ComponentLink3URL: https://datasheet.octopart.com:443/LSF0102DCTR-Texas-Instruments-datasheet-32037696.pdf?src-supplier=Texas+Instruments; ComponentLink3Description: https://datasheet.octopart.com:443/LSF0102DCTR-Texas-Instruments-datasheet-32037696.pdf?src-supplier=Texas+Instruments; ComponentLink4URL: https://datasheet.octopart.com:443/LSF0102DCTR-Texas-Instruments-datasheet-26524831.pdf?src-supplier=Texas+Instruments; ComponentLink4Description: https://datasheet.octopart.com:443/LSF0102DCTR-Texas-Instruments-datasheet-26524831.pdf?src-supplier=Texas+Instruments; ComponentLink5URL: https://datasheet.octopart.com:443/LSF0102DCTR-Texas-Instruments-datasheet-24561559.pdf?src-supplier=Texas+Instruments; ComponentLink5Description: https://datasheet.octopart.com:443/LSF0102DCTR-Texas-Instruments-datasheet-24561559.pdf?src-supplier=Texas+Instruments; ComponentLink6URL: https://datasheet.octopart.com:443/LSF0102DCTR-Texas-Instruments-datasheet-21773457.pdf?src-supplier=Texas+Instruments; ComponentLink6Description: https://datasheet.octopart.com:443/LSF0102DCTR-Texas-Instruments-datasheet-21773457.pdf?src-supplier=Texas+Instruments; ComponentLink7URL: https://sigma.octopart.com:443/49249897/technical_drawing/Texas-Instruments-LSF0102DCTR.pdf?src-supplier=Texas+Instruments; ComponentLink7Description: https://sigma.octopart.com:443/49249897/technical_drawing/Texas-Instruments-LSF0102DCTR.pdf?src-supplier=Texas+Instruments; ComponentLink8URL: https://datasheet.octopart.com:443/LSF0102DCTR-Texas-Instruments-datasheet-151512135.pdf?src-supplier=Upverter; ComponentLink8Description: https://datasheet.octopart.com:443/LSF0102DCTR-Texas-Instruments-datasheet-151512135.pdf?src-supplier=Upverter; ComponentLink9URL: https://datasheet.octopart.com:443/LSF0102DCTR-Texas-Instruments-datasheet-186209507.pdf?src-supplier=LCSC; ComponentLink9Description: https://datasheet.octopart.com:443/LSF0102DCTR-Texas-Instruments-datasheet-186209507.pdf?src-supplier=LCSC; ComponentLink10URL: https://datasheet.octopart.com:443/LSF0102DCTR-Texas-Instruments-datasheet-164415665.pdf?src-supplier=SHENGYU+ELECTRONICS; ComponentLink10Description: https://datasheet.octopart.com:443/LSF0102DCTR-Texas-Instruments-datasheet-164415665.pdf?src-supplier=SHENGYU+ELECTRONICS; ComponentLink11URL: http://sigma.octopart.com:80/reach_statement/Texas-Instruments-company-64.pdf?src-supplier=Compliance+Statements; ComponentLink11Description: http://sigma.octopart.com:80/reach_statement/Texas-Instruments-company-64.pdf?src-supplier=Compliance+Statements; ComponentLink12URL: http://sigma.octopart.com:80/conflict_mineral_statement/Texas-Instruments-company-63.pdf?src-supplier=Compliance+Statements; ComponentLink12Description: http://sigma.octopart.com:80/conflict_mineral_statement/Texas-Instruments-company-63.pdf?src-supplier=Compliance+Statements; Supplier 1: DigiKey; Supplier Part Number 1: 296-40398-1-ND; Supplier 2: DigiKey; Supplier Part Number 2: 296-40398-2-ND; Supplier 3: Mouser; Supplier Part Number 3: 595-LSF0102DCTR
footprint LSF0102DCTR
pins: 1 GND, 2 VREF_A, 3 A1, 4 A2, 5 B2, 6 B1, 7 VREF_B, 8 EN